# Altium schematic symbol library Resistors.SchLib: 25 symbols
Pins are listed as number, name and electrical type; pins without a type are passive.

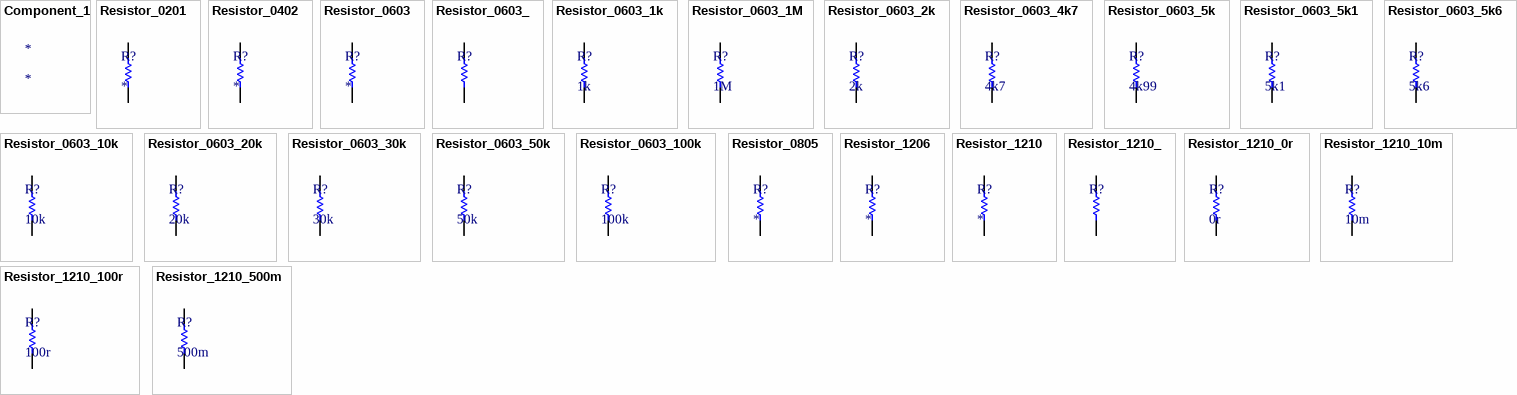
[diagram p0: symbols Component_1 to Resistor_1210_500m]

## Component_1
designator *

## Resistor_0201
designator R?
Value: *; Size: 0201
footprint Resistor_0201
pins: 1, 2

## Resistor_0402
designator R?
Value: *; Size: 0402
footprint Resistor_0402
pins: 1, 2

## Resistor_0603
designator R?
Value: *; Size: 0603
footprint Resistor_0603
pins: 1, 2

## Resistor_0603_
designator R?
Size: 0603
footprint Resistor_0603
pins: 1, 2

## Resistor_0603_1k
designator R?, comment 1k
Manufacturer Part: 0603WAF1001T5E; Value: 1k; Size: 0603; LCSC Part Number: C21190
footprint Resistor_0603
pins: 1, 2

## Resistor_0603_1M
designator R?, comment 1M
Manufacturer Part: 0603WAF1004T5E; Size: 0603; LCSC Part Number: C22935; Value: 1M
footprint Resistor_0603
pins: 1, 2

## Resistor_0603_2k
designator R?, comment 2k
Manufacturer Part: 0603WAF2001T5E; Size: 0603; LCSC Part Number: C22975; Value: 2k
footprint Resistor_0603
pins: 1, 2

## Resistor_0603_4k7
designator R?, comment 4k7
Manufacturer Part: 0603WAF4701T5E; Size: 0603; LCSC Part Number: C23162; Value: 4k7
footprint Resistor_0603
pins: 1, 2

## Resistor_0603_5k
designator R?, comment 4k99
Manufacturer Part: 0603WAF4991T5E; Size: 0603; LCSC Part Number: C23046; Value: 4k99
footprint Resistor_0603
pins: 1, 2

## Resistor_0603_5k1
designator R?, comment 5k1
Manufacturer Part: 0603WAF5101T5E; Size: 0603; LCSC Part Number: C23186; Value: 5k1
footprint Resistor_0603
pins: 1, 2

## Resistor_0603_5k6
designator R?, comment 5k6
Manufacturer Part: 0603WAF5601T5E; Size: 0603; LCSC Part Number: C23189; Value: 5k6
footprint Resistor_0603
pins: 1, 2

## Resistor_0603_10k
designator R?, comment 10k
Manufacturer Part: 0603WAF1002T5E; Size: 0603; LCSC Part Number: C25804; Value: 10k
footprint Resistor_0603
pins: 1, 2

## Resistor_0603_20k
designator R?, comment 20k
Manufacturer Part: 0603WAF2002T5E; Size: 0603; LCSC Part Number: C4184; Value: 20k
footprint Resistor_0603
pins: 1, 2

## Resistor_0603_30k
designator R?, comment 30k
Manufacturer Part: 0603WAF3002T5E; Size: 0603; LCSC Part Number: C22984; Value: 30k
footprint Resistor_0603
pins: 1, 2

## Resistor_0603_50k
designator R?, comment 50k
Manufacturer Part: 0603WAF4992T5E; Size: 0603; LCSC Part Number: C23184; Value: 50k
footprint Resistor_0603
pins: 1, 2

## Resistor_0603_100k
designator R?, comment 100k
Manufacturer Part: 0603WAF1003T5E; Size: 0603; LCSC Part Number: C25803; Value: 100k
footprint Resistor_0603
pins: 1, 2

## Resistor_0805
designator R?
Value: *; Size: 0805
footprint Resistor_0805
pins: 1, 2

## Resistor_1206
designator R?
Size: 1210; Value: *
footprint Resistor_1206
pins: 1, 2

## Resistor_1210
designator R?
Size: 1210; Value: *
footprint Resistor_1210
pins: 1, 2

## Resistor_1210_
designator R?
Size: 1210
footprint Resistor_1210
pins: 1, 2

## Resistor_1210_0r
designator R?, comment 0r
Manufacturer Part: RC1210FR-070RL; Size: 1210; LCSC Part Number: C137106; Value: 0r
footprint Resistor_1210
pins: 1, 2

## Resistor_1210_10m
designator R?, comment 10m
Manufacturer Part: CR1210FR010P05Z; Size: 1210; Value: 10m; LCSC Part Number: C175856
footprint Resistor_1210
pins: 1, 2

## Resistor_1210_100r
designator R?, comment 100r
Manufacturer Part: FRC1210F1000TS; Size: 1210; LCSC Part Number: C2933799; Value: 100r
footprint Resistor_1210
pins: 1, 2

## Resistor_1210_500m
designator R?, comment 500m
Manufacturer Part: FRL1210FR500TS; Size: 1210; LCSC Part Number: C2960668; Value: 500m
footprint Resistor_1210
pins: 1, 2